# Altium footprint library RoverLib.PcbLib: 1 footprints
Each footprint in its own frame and in the unit in brackets; x right, y up, seen from the top. Pads: shape width x height; smd on the part's side, far side on the other; paste and mask are expansions set on the pad; w line width, h text height; cw(c..) or ccw(c..) is an arc to the next point about the centre after c.
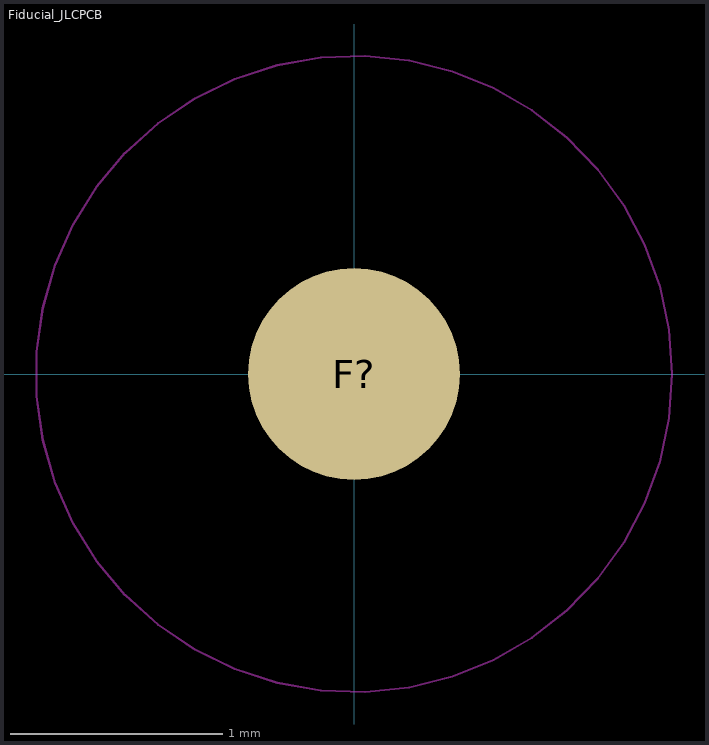
[diagram p0: the footprint, top view; thin cyan lines are the x and y axes]

## Fiducial_JLCPCB [mm]
pads (1):
  round 1 smd paste-2539.97 mask+1: F?(0,0)
Top Layer keep-out:
  circle w0.01: c0,0 r1.5
3D body: height -0.1, standoff -0.2, extent -0.5,-0.5 0.5,0.5